# Altium footprint library 3.11-micro USB 、3.1 Type C接口.PcbLib: 31 footprints (part 2 of 2)
Each footprint in its own frame and in the unit in brackets; x right, y up, seen from the top. Pads: shape width x height; smd on the part's side, far side on the other; paste and mask are expansions set on the pad; w line width, h text height; cw(c..) or ccw(c..) is an arc to the next point about the centre after c.
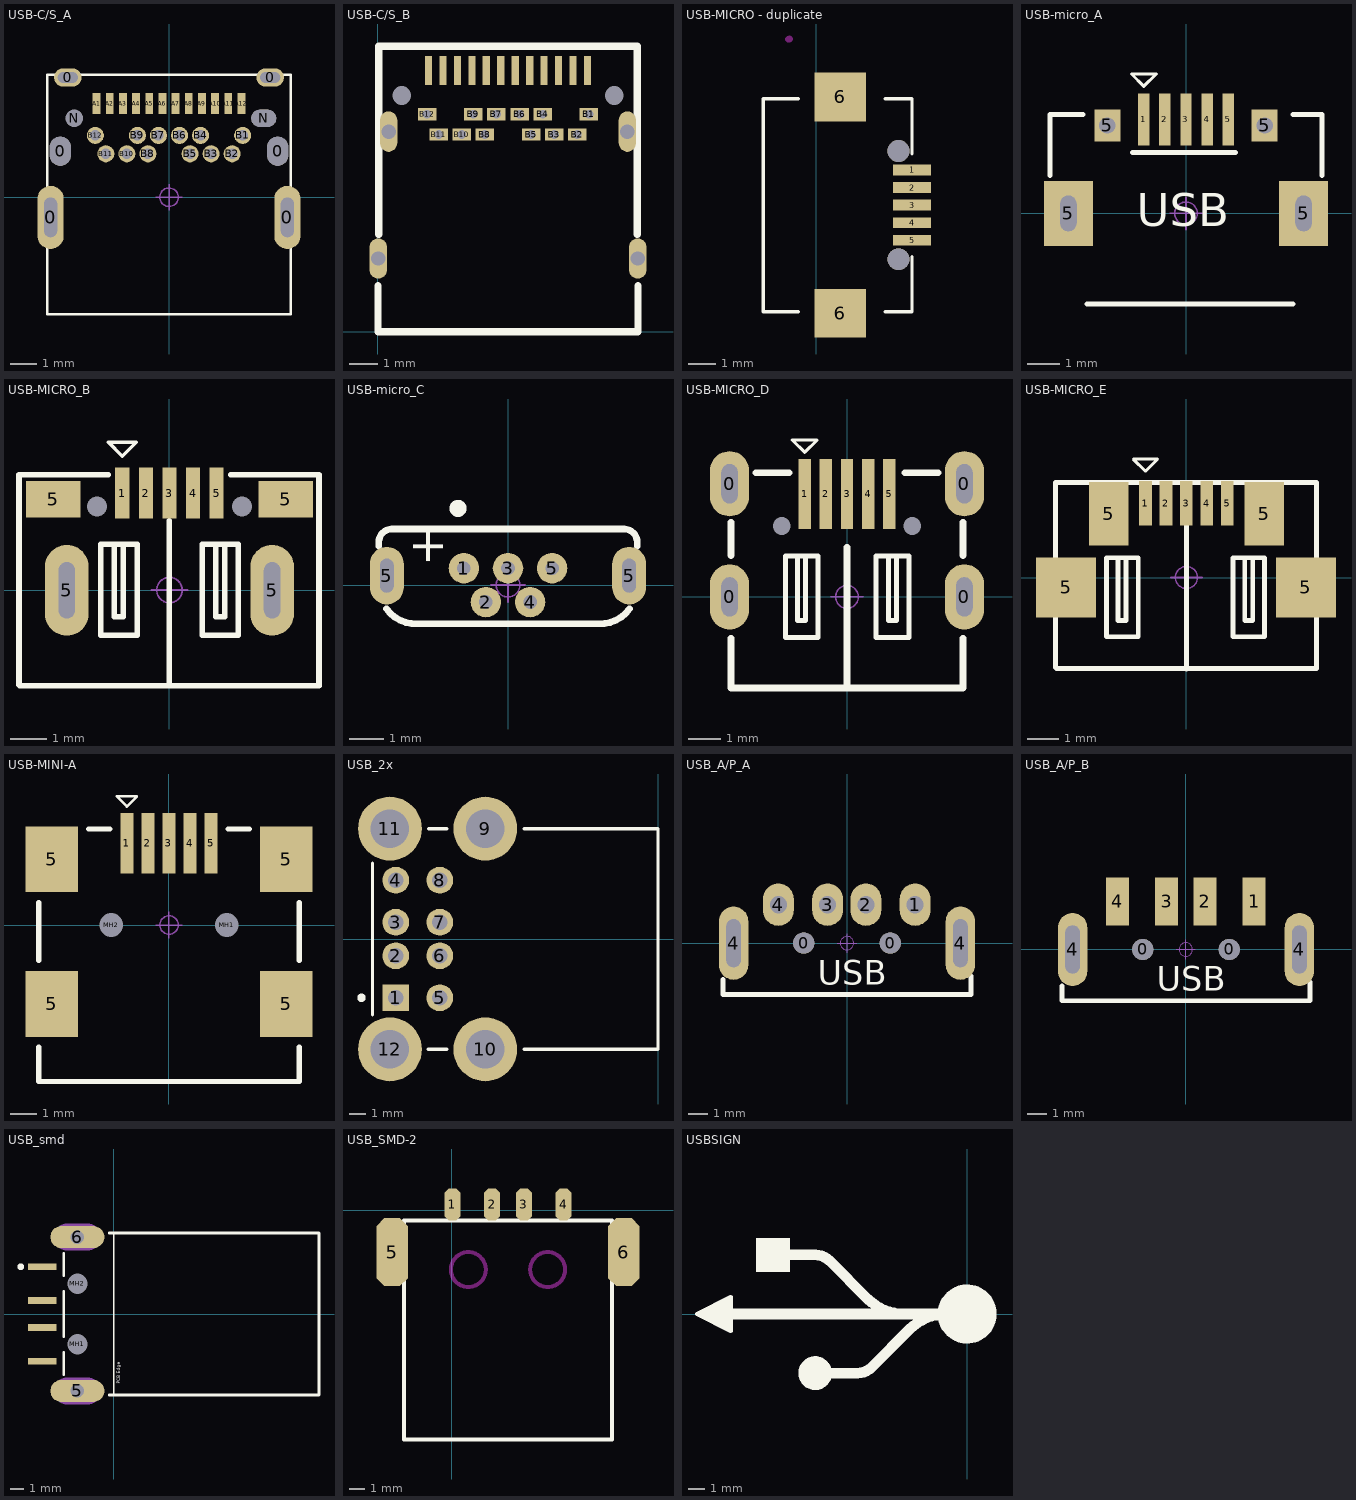
[diagram p1: the footprints below, top view; thin cyan lines are the x and y axes]

## USB-C/S_A [mm]
pads (32):
  oval 1x2.4 hole 0.5 slot 1.5 at 90 deg: 0(-4.5,-0.765) 0(4.5,-0.765)
  oval 0.8x1.1 hole 0.8 slot 1.1 at 90 deg: 0(-4.13,1.75) 0(4.13,1.75)
  oval 1.05x0.7 hole 0.4 slot 0.75 at 0 deg: 0(-3.845,4.55) 0(3.845,4.55)
  rect 0.3x0.8 smd: A1(-2.75,3.56) A2(-2.25,3.56) A3(-1.75,3.56) A4(-1.25,3.56) A5(-0.75,3.56) A6(-0.25,3.56) A7(0.25,3.56) A8(0.75,3.56) A9(1.25,3.56) A10(1.75,3.56) A11(2.25,3.56) A12(2.75,3.56)
  round 0.65 hole 0.4: B1(2.8,2.35) B2(2.4,1.65) B3(1.6,1.65) B4(1.2,2.35) B5(0.8,1.65) B6(0.4,2.35) B7(-0.4,2.35) B8(-0.8,1.65) B9(-1.2,2.35) B10(-1.6,1.65) B11(-2.4,1.65) B12(-2.8,2.35)
  round 0.65 hole 0.65: N(-3.6,3)
  oval 0.95x0.65 hole 0.65 slot 0.95 at 0 deg: N(3.6,3)
Top Overlay:
  lines w0.1: -4.625,-4.45 4.625,-4.45 4.625,4.65 -4.625,4.65 -4.625,-4.45
Mechanical 15:
  circle w0.05: c0,0 r0.35
  lines w0.05: -0.5,0 0.5,0 ; 0,-0.5 0,0.5
3D body "type-Cĸ?": height 3.35, standoff -0.9, extent -4.625,-4.45 4.625,4.65

## USB-C/S_B [mm]
pads (30):
  rect 0.25x1 smd: A1(1.75,9.037) A2(2.25,9.037) A3(2.75,9.037) A4(3.25,9.037) A5(3.75,9.037) A6(4.25,9.037) A7(4.75,9.037) A8(5.25,9.037) A9(5.75,9.037) A10(6.25,9.037) A11(6.75,9.037) A12(7.25,9.037)
  rect 0.64x0.42 hole 0.3: B1(7.3,7.52) B2(6.9,6.82) B3(6.1,6.82) B4(5.7,7.52) B5(5.3,6.82) B6(4.9,7.52) B7(4.1,7.52) B8(3.7,6.82) B9(3.3,7.52) B10(2.9,6.82) B11(2.1,6.82) B12(1.7,7.52)
  oval 0.6x1.4 hole 0.5: ""(0.01,2.53) ""(0.37,6.92) ""(8.63,6.92) ""(8.99,2.53)
  round 0 hole 0.65: ""(0.825,8.17) ""(8.175,8.17)
Top Overlay:
  lines w0.254: 0,1.583 0,0 9,0 9,1.583 ; 0.025,3.37 0.025,9.87 8.975,9.87 8.975,3.37

## USB-MICRO - duplicate [mm]
pads (7):
  rect 1.4x0.4 smd: 1(3.544,13.803) 2(3.544,13.153) 3(3.544,12.503) 4(3.544,11.853) 5(3.544,11.203)
  rect 1.9x1.8 smd: 6(0.894,8.503) 6(0.894,16.503)
via 3.044,10.503 diameter 0.8 hole 0.8
via 3.044,14.503 diameter 0.8 hole 0.8
Top Overlay:
  lines w0.127: -1.964,8.566 -0.656,8.566 ; -1.964,8.603 -1.964,16.403 ; -1.964,16.44 -0.656,16.44 ; 2.544,8.566 3.544,8.566 3.544,10.598 ; 2.544,16.44 3.544,16.44 ; 3.544,14.408 3.544,16.403
Keep-Out Layer:
  lines w0.254: -1.016,18.633 -0.991,18.644
3D body "User Library-Micro USB.STEP": height 2.72, standoff -0.22, extent -1.861,8.513 3.569,16.493

## USB-micro_A [mm] "micro型USB ，5.7*7.8*2.5mm"
pads (9):
  rect 0.35x1.6 smd: 1(-1.3,2.9) 2(-0.65,2.9) 3(0,2.9) 4(0.65,2.9) 5(1.3,2.9)
  rect 1.5x2 hole 0.5 slot 1.1 at 90 deg: 5(-3.625,0) 5(3.625,0)
  rect 0.8x1 hole 0.5: 5(-2.425,2.71) 5(2.425,2.71)
Top Overlay:
  lines w0.1: -1.681,4.297 -0.919,4.297 -1.3,3.916 -1.681,4.297
  lines w0.152: -4.191,1.168 -4.191,3.048 -3.175,3.048 ; -3.048,-2.794 3.302,-2.794 ; -1.65,1.875 1.525,1.875 ; 3.302,3.048 4.191,3.048 4.191,1.168
  text "USB" at -1.524,-0.402 h1.02
Mechanical 15:
  circle w0.05: c0,0 r0.35
  lines w0.05: -0.5,0 0.5,0 ; 0,-0.5 0,0.5
3D body "USB micro_A.STEP": height 2.8, standoff -0.95, extent -4.001,-2.71 4.001,2.89

## USB-MICRO_B [mm] "micro型USB ，5.9*8.2*2.5mm"
pads (11):
  round 0 hole 0.55 unplated: 0(-2,2.294) 0(2,2.294)
  rect 0.394x1.4 smd: 1(-1.295,2.667) 2(-0.648,2.667) 3(0,2.667) 4(0.648,2.667) 5(1.295,2.667)
  rect 1.5x1 smd: 5(-3.2,2.5) 5(3.2,2.5)
  oval 1.2x2.5 hole 0.45 slot 1.55 at 90 deg: 5(-2.825,-0.006) 5(2.825,-0.006)
Top Overlay:
  lines w0.1: -1.676,4.064 -0.914,4.064 -1.295,3.683 -1.676,4.064
  lines w0.15: -4.14,3.175 -1.689,3.175 ; 0,-2.629 0,1.905 ; 1.689,3.175 4.115,3.175
  lines w0.152: -4.14,-2.603 -4.14,3.175 ; -4.115,-2.629 4.089,-2.629 ; -1.524,1.257 -1.524,-0.728 -1.321,-0.728 -1.27,-0.728 -1.27,1.257 ; 1.27,1.257 1.27,-0.728 1.524,-0.728 1.524,1.257 ; 4.115,-2.629 4.115,3.175 ; -1.885,-1.243 -1.885,1.257 -0.885,1.257 -0.885,-1.243 -1.885,-1.243 ; 0.896,-1.243 1.896,-1.243 1.896,1.257 0.896,1.257 0.896,-1.243
Mechanical 15:
  circle w0.05: c0,0 r0.35
  lines w0.05: -0.5,0 0.5,0 ; 0,-0.5 0,0.5
3D body "USB micro_B.STEP": height 2.8, standoff -1.35, extent -4.001,-2.716 4.001,2.884

## USB-micro_C [mm] "micro型USB ，5.7*7.8*2.5mm"
pads (7):
  round 0.9 hole 0.4: 1(-1.3,0.5) 2(-0.65,-0.5) 3(0,0.5) 4(0.65,-0.5) 5(1.3,0.5)
  oval 1x1.7 hole 0.4 slot 1 at 90 deg: 5(-3.575,0.28) 5(3.575,0.28)
Top Overlay:
  circle w0.254: c-1.473,2.261 r0.127
  lines w0.2: -3.81,1.143 -3.81,1.27 cw(c-3.429,1.27) -3.429,1.651 -3.175,1.651 -2.794,1.651 2.794,1.651 3.175,1.651 3.429,1.651 cw(c3.429,1.27) 3.81,1.27 3.81,1.143 ; -3.587,-0.697 ccw(c-2.718,-0.076) -2.667,-1.143 ; -2.629,-1.143 -2.413,-1.143 2.413,-1.143 2.667,-1.143 ccw(c2.718,-0.076) 3.587,-0.697
  text "+" at -1.905,0.559 h1.02
Mechanical 15:
  circle w0.05: c0,0 r0.35
  lines w0.05: -0.5,0 0.5,0 ; 0,-0.5 0,0.5
3D body "USB micro_C.STEP": height 5.65, standoff -1.55, extent -4.001,-1.207 4.001,1.767

## USB-MICRO_D [mm] "micro型USB ，6.7*7.5*2.5mm"
pads (11):
  oval 1.2x2 hole 0.5 slot 1.2 at 90 deg: 0(-3.6,0) 0(-3.6,3.47) 0(3.6,0) 0(3.6,3.47)
  round 0 hole 0.55 unplated: 0(-2,2.17) 0(2,2.17)
  rect 0.381x2.15 smd: 1(-1.3,3.16) 2(-0.65,3.16) 3(0,3.16) 4(0.65,3.16) 5(1.3,3.16)
Top Overlay:
  lines w0.1: -1.681,4.811 -0.919,4.811 -1.3,4.43 -1.681,4.811
  lines w0.152: -1.524,1.257 -1.524,-0.728 -1.321,-0.728 -1.27,-0.728 -1.27,1.257 ; 1.27,1.257 1.27,-0.728 1.524,-0.728 1.524,1.257 ; -1.885,-1.243 -0.885,-1.243 -0.885,1.257 -1.885,1.257 -1.885,-1.243 ; 0.896,-1.243 0.896,1.257 1.896,1.257 1.896,-1.243 0.896,-1.243
  lines w0.203: -3.556,-1.27 -3.556,-2.794 3.556,-2.794 3.556,-1.27 ; -3.556,1.27 -3.556,2.286 ; -2.794,3.81 -1.778,3.81 ; 0,-2.75 0,1.524 ; 1.778,3.81 2.794,3.81 ; 3.556,1.27 3.556,2.286
Mechanical 15:
  circle w0.05: c0,0 r0.35
  lines w0.05: -0.5,0 0.5,0 ; 0,-0.5 0,0.5
3D body "USB micro_D.STEP": height 2.79, standoff -0.95, extent -3.985,-2.75 3.985,3.95

## USB-MICRO_E [mm] "micro型USB ，5.9*8.2*2.5mm"
pads (9):
  rect 0.4x1.4 smd: 1(-1.296,2.355) 2(-0.648,2.355) 3(0,2.355) 4(0.648,2.355) 5(1.295,2.355)
  rect 1.9x1.9 smd: 5(-3.81,-0.312) 5(3.784,-0.312)
  rect 1.25x2 smd: 5(-2.464,2.025) 5(2.464,2.025)
Top Overlay:
  lines w0.1: -1.677,3.752 -1.296,3.371 -0.915,3.752 -1.677,3.752
  lines w0.152: -4.14,-2.852 -4.14,3.016 ; -4.115,-2.877 4.089,-2.877 ; -4.09,3.016 4.089,3.016 ; -2.165,0.628 -2.165,-1.357 -1.962,-1.357 -1.911,-1.357 -1.911,0.628 ; 0,-2.889 0,2.99 ; 1.848,0.628 1.848,-1.357 2.102,-1.357 2.102,0.628 ; 4.115,-2.877 4.115,3.016 ; -2.526,-1.872 -2.526,0.628 -1.526,0.628 -1.526,-1.872 -2.526,-1.872 ; 1.474,-1.872 2.474,-1.872 2.474,0.628 1.474,0.628 1.474,-1.872
Mechanical 15:
  circle w0.05: c0,0.006 r0.35
  lines w0.05: -0.5,0.006 0.5,0.006 ; 0,-0.494 0,0.506
3D body "USB-MICRO B型 ?": height 2.69, standoff -0.24, extent -3.982,-2.772 3.982,2.65

## USB-MINI-A [mm] "MINI型USB，7.9*7.5*4.1mm"
pads (11):
  rect 0.5x2.3 smd: 1(-1.6,3.108) 2(-0.8,3.108) 3(0,3.108) 4(0.8,3.108) 5(1.6,3.108)
  rect 2x2.5 smd: 5(-4.45,-3) 5(-4.45,2.5) 5(4.45,-3) 5(4.45,2.5)
  round 0.6 hole 0.9 unplated: MH1(2.2,0) MH2(-2.2,0)
Top Overlay:
  lines w0.1: -1.981,4.886 -1.6,4.505 -1.219,4.886 -1.981,4.886
  lines w0.2: -4.95,-4.65 -4.95,-5.95 4.95,-5.95 4.95,-4.65 ; -4.95,-1.35 -4.95,0.85 ; -3.05,3.65 -2.25,3.65 ; 2.25,3.65 3.05,3.65 ; 4.95,-1.35 4.95,0.85
Mechanical 15:
  circle w0.05: c0,0 r0.35
  lines w0.05: -0.5,0 0.5,0 ; 0,-0.5 0,0.5
3D body "USB MINI B型 ?": height 3.95, standoff -0.7, extent -4.75,-6 4.75,3.7

## USB_2x [mm] "USB母座A型"
height 15.51
pads (12):
  rect 1.6x1.6 hole 0.92: 1(-15.61,-3.5)
  round 1.6 hole 0.92: 2(-15.61,-1) 3(-15.61,1) 4(-15.61,3.5) 5(-12.99,-3.5) 6(-12.99,-1) 7(-12.99,1) 8(-12.99,3.5)
  round 3.8 hole 2.3: 9(-10.28,6.57) 10(-10.28,-6.57) 11(-15.96,6.57) 12(-15.96,-6.57)
Top Overlay:
  circle w0.25: c-17.65,-3.5 r0.125
  lines w0.2: -17,-4.51 -17,4.51 ; -13.68,-6.565 -12.58,-6.565 ; -13.66,6.565 -12.58,6.565 ; -7.97,-6.565 0,-6.565 0,6.565 -7.97,6.565

## USB_A/P_A [mm] "A型USB 插头，20*13*4.5mm"
height 1.75
pads (8):
  round 1.1 hole 1.1: 0(-2.25,0) 0(2.25,0)
  oval 1.6x2.2 hole 0.9: 1(3.543,2) 2(0.987,2) 3(-1.013,2) 4(-3.569,2)
  oval 1.524x3.81 hole 0.762 slot 2.5 at 90 deg: 4(-5.9,0) 4(5.9,0)
Top Overlay:
  lines w0.254: -6.45,-1.9 -6.45,-2.667 6.45,-2.667 6.45,-1.7
  text "USB" at -1.524,-2.159 h1.27
Mechanical 15:
  circle w0.05: c0,0 r0.35
  lines w0.05: -0.5,0 0.5,0 ; 0,-0.5 0,0.5
3D body "USB A型 ?": height 3.25, standoff -2.52, extent -6.473,-17.9 6.473,2.105

## USB_A/P_B [mm] "A型USB 插头，20*13*4.5mm"
height 1.75
pads (8):
  round 1.1 hole 1.1: 0(-2.237,0) 0(2.263,0)
  rect 1.2x2.5 smd: 1(3.556,2.508) 2(1,2.508) 3(-1,2.508) 4(-3.556,2.508)
  oval 1.524x3.81 hole 0.762 slot 2.5 at 90 deg: 4(-5.887,0) 4(5.913,0)
Top Overlay:
  lines w0.254: -6.437,-1.9 -6.437,-2.667 6.463,-2.667 6.463,-1.7
  text "USB" at -1.511,-2.159 h1.27
Mechanical 15:
  circle w0.05: c0,0 r0.35
  lines w0.05: -0.5,0 0.5,0 ; 0,-0.5 0,0.5
3D body "USB A型 ?": height 3.25, standoff -2.52, extent -6.46,-17.9 6.487,2.7

## USB_smd [mm] "Connector; USB1.1, Type A, SM; 4 Position; Right Angle"
height 4.5
pads (8):
  rect 2.1x0.5 smd: 1(-5.3,3.5) 2(-5.3,1) 3(-5.3,-1) 4(-5.3,-3.5)
  oval 4x1.65 hole 1: 5(-2.7,-5.7) 6(-2.7,5.7)
  round 1.2 hole 1.5 unplated: MH1(-2.7,-2.25) MH2(-2.7,2.25)
Top Overlay:
  circle w0.25: c-6.9,3.5 r0.125
  lines w0.1: 0,-6 0,6
  lines w0.2: -3.7,-4.475 -3.7,-2.83 ; -3.7,-1.68 -3.7,1.68 ; -3.7,2.83 -3.7,4.475 ; -0.33,-6 15.2,-6 15.2,6 -0.33,6
  text "PCB Edge" at 0.473,-5.173 h0.25
Mechanical 1:
  lines w1: -3.45,-5.7 -1.95,-5.7 ; -3.45,5.7 -1.95,5.7
Mechanical 2:
  lines w2.016: -3.45,-5.7 -1.95,-5.7 ; -3.45,5.7 -1.95,5.7

## USB_SMD-2 [mm]
pads (6):
  oct 1x2 smd: 1(0.056,0.357) 2(2.556,0.357) 3(4.556,0.357) 4(7.056,0.357)
  oct 2x4.3 smd: 5(-3.744,-2.643) 6(10.856,-2.643)
Top Overlay:
  lines w0.254: -2.994,-14.443 10.106,-14.443 10.106,-0.643 -2.994,-0.643 -2.994,-14.443
Keep-Out Layer:
  circle w0.254: c1.056,-3.743 r1.1
  circle w0.254: c6.056,-3.743 r1.1
3D body "Samtec-USB-A-S-F-B-SM1.STEP": height 6.35, standoff -1.53, extent -3.733,-14.41 10.867,0.72

## USBSIGN [mm]
Top Overlay:
  circle w1.016: c-9.144,-3.556 r0.508
  circle w1.524: c0,0 r1.016
  region: -10.668,4.572 -12.7,4.572 -12.7,2.54 -10.668,2.54
  lines w0.254: -15.24,0.025 -14.681,0.483 -14.732,0 -15.469,0.152 -14.656,-0.457 -14.453,0.61 -15.723,0.025 -14.453,-0.635 -14.453,0.787 -15.951,0.025 -14.224,-0.838 ; -16.256,0 -14.224,1.016 -14.224,-1.016 -16.256,0
  lines w0.635: -14.732,0 -8.636,0 0,0 -1.27,0 ccw(c-1.27,-3.066) -3.438,-0.898 -5.737,-3.197 cw(c-6.604,-2.33) -6.604,-3.556 -8.636,-3.556 ; -11.176,3.556 -9.144,3.556 cw(c-9.144,2.33) -8.277,3.197 -5.978,0.898 ccw(c-3.81,3.066) -3.81,0 -3.048,0 ; -8.128,-3.556 -7.874,-3.556 ; -4.318,0 -2.54,0